# Altium footprint library PcbLib.PcbLib: 5 footprints
Each footprint in its own frame and in the unit in brackets; x right, y up, seen from the top. Pads: shape width x height; smd on the part's side, far side on the other; paste and mask are expansions set on the pad; w line width, h text height; cw(c..) or ccw(c..) is an arc to the next point about the centre after c.
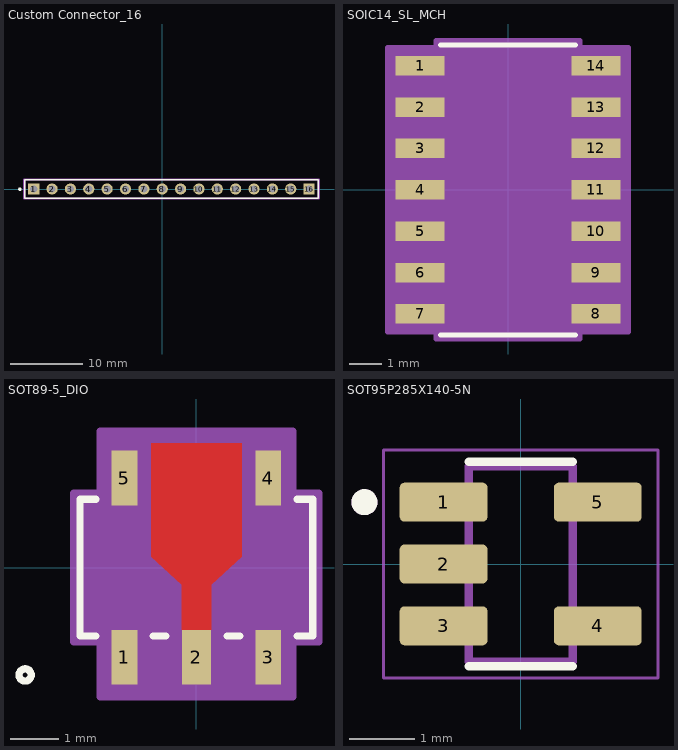
[diagram p0: the footprints below, top view; thin cyan lines are the x and y axes]

## Custom Connector_16 [mm]
pads (16):
  rect 1.55x1.55 hole 1 paste-2539.97 mask+0: 1(-17.78,0) 16(20.32,0)
  round 1.55 hole 1 paste-2539.97 mask+0: 2(-15.24,0) 3(-12.7,0) 5(-7.62,0) 6(-5.08,0) 7(-2.54,0) 8(0,0) 9(2.54,0) 11(7.62,0) 12(10.16,0) 13(12.7,0) 14(15.24,0) 15(17.78,0)
  round 1.55 hole 1 paste-2539.97 mask-2539.97: 4(-10.16,0) 10(5.08,0)
Top Overlay:
  circle w0.25: c-19.69,-0.025 r0.125
  lines w0.2: 13.97,-1.27 21.59,-1.27 21.59,1.27 13.97,1.27 ; 19.05,-1.27 11.43,-1.27 3.81,-1.27 -3.81,-1.27 -11.43,-1.27 -19.05,-1.27 -19.05,1.27 -11.43,1.27 -3.81,1.27 3.81,1.27 11.43,1.27 19.05,1.27
Top Solder:
  circle w0.775: c5.08,0 r0.387
  circle w0.775: c-10.16,0 r0.387
Bottom Solder:
  circle w0.775: c5.08,0 r0.387
  circle w0.775: c-10.16,0 r0.387
Top Courtyard:
  lines w0.2: -11.53,-1.37 -3.71,-1.37 ; -11.53,1.37 -3.71,1.37 ; -11.33,-1.37 -19.15,-1.37 -19.15,1.37 -11.33,1.37 ; -3.91,-1.37 3.91,-1.37 ; -3.91,1.37 3.91,1.37 ; 3.71,-1.37 11.53,-1.37 ; 3.71,1.37 11.53,1.37 ; 11.33,-1.37 19.15,-1.37 ; 11.33,1.37 19.15,1.37 ; 13.87,-1.37 21.69,-1.37 21.69,1.37 13.87,1.37
Top 3D Body:
  lines w0.2: 13.97,-1.27 21.59,-1.27 21.59,1.27 13.97,1.27 ; 19.05,-1.27 11.43,-1.27 3.81,-1.27 -3.81,-1.27 -11.43,-1.27 -19.05,-1.27 -19.05,1.27 -11.43,1.27 -3.81,1.27 3.81,1.27 11.43,1.27 19.05,1.27
Top Assembly:
  lines w0.2: -11.53,-1.37 -3.71,-1.37 ; -11.53,1.37 -3.71,1.37 ; -11.33,-1.37 -19.15,-1.37 -19.15,1.37 -11.33,1.37 ; -3.91,-1.37 3.91,-1.37 ; -3.91,1.37 3.91,1.37 ; 3.71,-1.37 11.53,-1.37 ; 3.71,1.37 11.53,1.37 ; 11.33,-1.37 19.15,-1.37 ; 11.33,1.37 19.15,1.37 ; 13.87,-1.37 21.69,-1.37 21.69,1.37 13.87,1.37
  text ".Designator" at -7.112,2.347 h1
Top Component Center:
  lines w0.1: -15.74,0 -14.74,0 ; -15.24,-0.5 -15.24,0.5 ; -8.12,0 -7.12,0 ; -7.62,-0.5 -7.62,0.5 ; -0.5,0 0.5,0 ; 0,-0.5 0,0.5 ; 7.12,0 8.12,0 ; 7.62,-0.5 7.62,0.5 ; 14.74,0 15.74,0 ; 15.24,-0.5 15.24,0.5
3D body "Conn_Molex_90120-0763_eec.STEP": height 0.25, standoff 0, extent 3.71,-1.37 11.53,1.37
3D body "Conn_Molex_90120-0763_eec.STEP": height 0.25, standoff 0, extent -3.91,-1.37 3.91,1.37
3D body "Conn_Molex_90120-0763_eec.STEP": height 0.25, standoff 0, extent -11.53,-1.37 -3.71,1.37
3D body "Conn_Molex_90120-0763_eec.STEP": height 0.25, standoff 0, extent -19.15,-1.37 -11.33,1.37
3D body "Conn_Molex_90120-0763_eec.STEP": height 0.25, standoff 0, extent 11.33,-1.37 19.15,1.37

## PCBComponent_1 [mm]

## SOIC14_SL_MCH [mm]
pads (14):
  rect 1.5x0.6 smd paste+0 mask+0: 1(-2.7,3.81) 2(-2.7,2.54) 3(-2.7,1.27) 4(-2.7,0) 5(-2.7,-1.27) 6(-2.7,-2.54) 7(-2.7,-3.81) 8(2.7,-3.81) 9(2.7,-2.54) 10(2.7,-1.27) 11(2.7,0) 12(2.7,1.27) 13(2.7,2.54) 14(2.7,3.81)
Top Overlay:
  lines w0.152: -2.077,-4.452 2.077,-4.452 ; -2.077,4.452 2.077,4.452
Mechanical 13:
  lines w0: -0.305,4.325 ccw(c0,4.325) 0.305,4.325
  lines w0.025: -1.95,-4.325 -1.95,4.325 1.95,4.325 1.95,-4.325 -1.95,-4.325
Mechanical 15:
  region: -2.204,-4.364 -3.704,-4.364 -3.704,4.364 -2.204,4.364 -2.204,4.579 2.204,4.579 2.204,4.364 3.704,4.364 3.704,-4.364 2.204,-4.364 2.204,-4.579 -2.204,-4.579
  lines w0.152: -3.704,-4.364 -2.204,-4.364 -2.204,-4.579 2.204,-4.579 2.204,-4.364 3.704,-4.364 3.704,4.364 2.204,4.364 2.204,4.579 -2.204,4.579 -2.204,4.364 -3.704,4.364 -3.704,-4.364
3D body "SOIC14_SL_MCH.step": height 1.75, standoff 0, extent -3.1,-4.325 3.1,4.325

## SOT89-5_DIO [mil]
pads (5):
  rect 21x45 smd paste+0 mask+0: 1(-59,-73.5) 3(59,-73.5) 4(59,73.5) 5(-59,73.5)
  rect 24x45 smd paste+0 mask+0: 2(0,-73.5)
Top Layer:
  region: 12,-51 -12,-51 -12,-14 -37,9 -37,102 -1,102 1,102 37,102 37,9 12,-14
Top Overlay:
  circle w6: c-140.5,-88 r5
  lines w6: -82.6,-56 -95.5,-56 -95.5,56 -82.6,56 ; -35.4,-56 -25.1,-56 ; 25.1,-56 35.4,-56 ; 82.6,-56 95.5,-56 95.5,56 82.6,56
Top Paste:
  region: 12,-51 -12,-51 -12,-14 -37,9 -37,102 -1,102 1,102 37,102 37,9 12,-14
Top Solder:
  region: 12,-51 -12,-51 -12,-14 -37,9 -37,102 -1,102 1,102 37,102 37,9 12,-14
Mechanical 13:
  circle w0: c-80.5,-41 r5
  lines w1: -90.5,-51 -90.5,51 90.5,51 90.5,-51 -90.5,-51 ; -69.5,-88 -48.5,-88 -48.5,-51 -69.5,-51 -69.5,-88 ; -69.5,51 -69.5,88 -48.5,88 -48.5,51 -69.5,51 ; -12,-88 12,-88 12,-51 -12,-51 -12,-88 ; 48.5,-88 69.5,-88 69.5,-51 48.5,-51 48.5,-88 ; 48.5,51 48.5,88 69.5,88 69.5,51 48.5,51
Mechanical 15:
  region: -100.5,-61 -100.5,61 -79,61 -79,112 79,112 79,61 100.5,61 100.5,-61 79,-61 79,-106 -79,-106 -79,-61
  lines w6: -100.5,-61 -79,-61 -79,-106 79,-106 79,-61 100.5,-61 100.5,61 79,61 79,112 -79,112 -79,61 -100.5,61 -100.5,-61
3D body "SOT89-5_DIO.step": height 65.12, standoff 0, extent -90.51,-87.99 90.51,87.99

## SOT95P285X140-5N [mm]
pads (5):
  rrect25% 1.35x0.6 smd: 1(-1.185,0.95) 2(-1.185,0) 3(-1.185,-0.95) 4(1.185,-0.95) 5(1.185,0.95)
Top Overlay:
  circle w0.2: c-2.4,0.95 r0.1
  lines w0.127: -0.8,-1.57 0.8,-1.57 ; -0.8,1.57 0.8,1.57
Mechanical 13:
  circle w0.2: c-2.4,0.95 r0.1
  lines w0.127: -0.8,-1.5 0.8,-1.5 0.8,1.5 -0.8,1.5 -0.8,-1.5
Mechanical 15:
  lines w0.05: -2.11,-1.75 2.11,-1.75 2.11,1.75 -2.11,1.75 -2.11,-1.75